# EAGLE library part 6210XX21021_62100821021 (library WR-PHD)
WR-PHD 1.27 mm SMT Dual Pin Header, H=3.80 mm Article Properties Pins 4 unitless; 6 unitless; 8 unitless; 10 unitless; 14 unitless; 16 unitless; 20 unitless; 28 unitless; 40 unitless; 44 unitless; 50 unitless General Information Operating Temperature -40 °C up to +105 °C Compliance Lead free / RoHS Pitch 1.27 mm Durability 50 Cycles Rows Dual Gender Pin Header Type Straight Material Properties Insulator Material PA9T Insulator Flammability Rating UL94 V-0 Contact Material Copper Alloy Contact Plating Gold Contact Type Stamped Certification UL Approval E323964 Packaging Properties Packaging Tape and Reel with Cap; Tube Electrical Properties IR 1 A Withstanding Voltage 500 V (AC) Contact Resistance 20 mΩ RISO 1000 MΩ <https://www.we-online.com/components/media/o33195v209%20Family_WR-PDH_621xxx21021.jpg> Details see: www.we-online.com/en/components/products/PHD_1_27_SMT_DUAL_PIN_HEADER_6210XX21021 <www.we-online.com/catalog/PHD_1_27_SMT_DUAL_PIN_HEADER_6210XX21021/?utm_source=eagle_model&utm_medium=description_link&utm_campaign=eisos_eagle> Updated by Ella 2024-01-31 2024 (C) Würth Elektronik
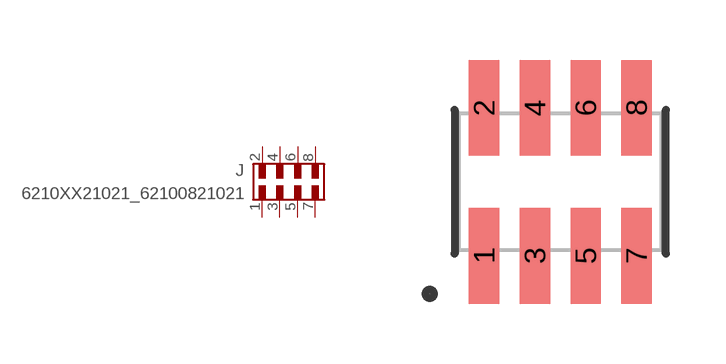
[diagram p396: symbol with the pads of 62100821021; footprint 62100821021]

Designator prefix J

## 6210XX21021_62100821021 (DATASHEET-URL: https://www.we-online.com/redexpert/spec/62100821021?ae; GENDER: Pin Header; IR: 1A; MOUNT: SMT; PACKAGING: Tube; PART-NUMBER: 62100821021; PINS: 8; PITCH: 1.27 mm; ROWS: Dual; TYPE: Straight; VALUE: 62100821021)  [62100821021]
1  1  pas
2  2  pas
3  3  pas
4  4  pas
5  5  pas
6  6  pas
7  7  pas
8  8  pas

## Footprint 62100821021 (pad centres in mm)
WR-PHD 1.27 mm SMT Dual Pin Header, H=3.80 mm, 8 Pins
smd 0.76 x 2.4: 1 -1.905,-1.85; 2 -1.905,1.85; 3 -0.635,-1.85; 4 -0.635,1.85; 5 0.635,-1.85; 6 0.635,1.85; 7 1.905,-1.85; 8 1.905,1.85